# Altium footprint library Connector.PcbLib: 272 footprints (part 4 of 17)
Each footprint in its own frame and in the unit in brackets; x right, y up, seen from the top. Pads: shape width x height; smd on the part's side, far side on the other; paste and mask are expansions set on the pad; w line width, h text height; cw(c..) or ccw(c..) is an arc to the next point about the centre after c.
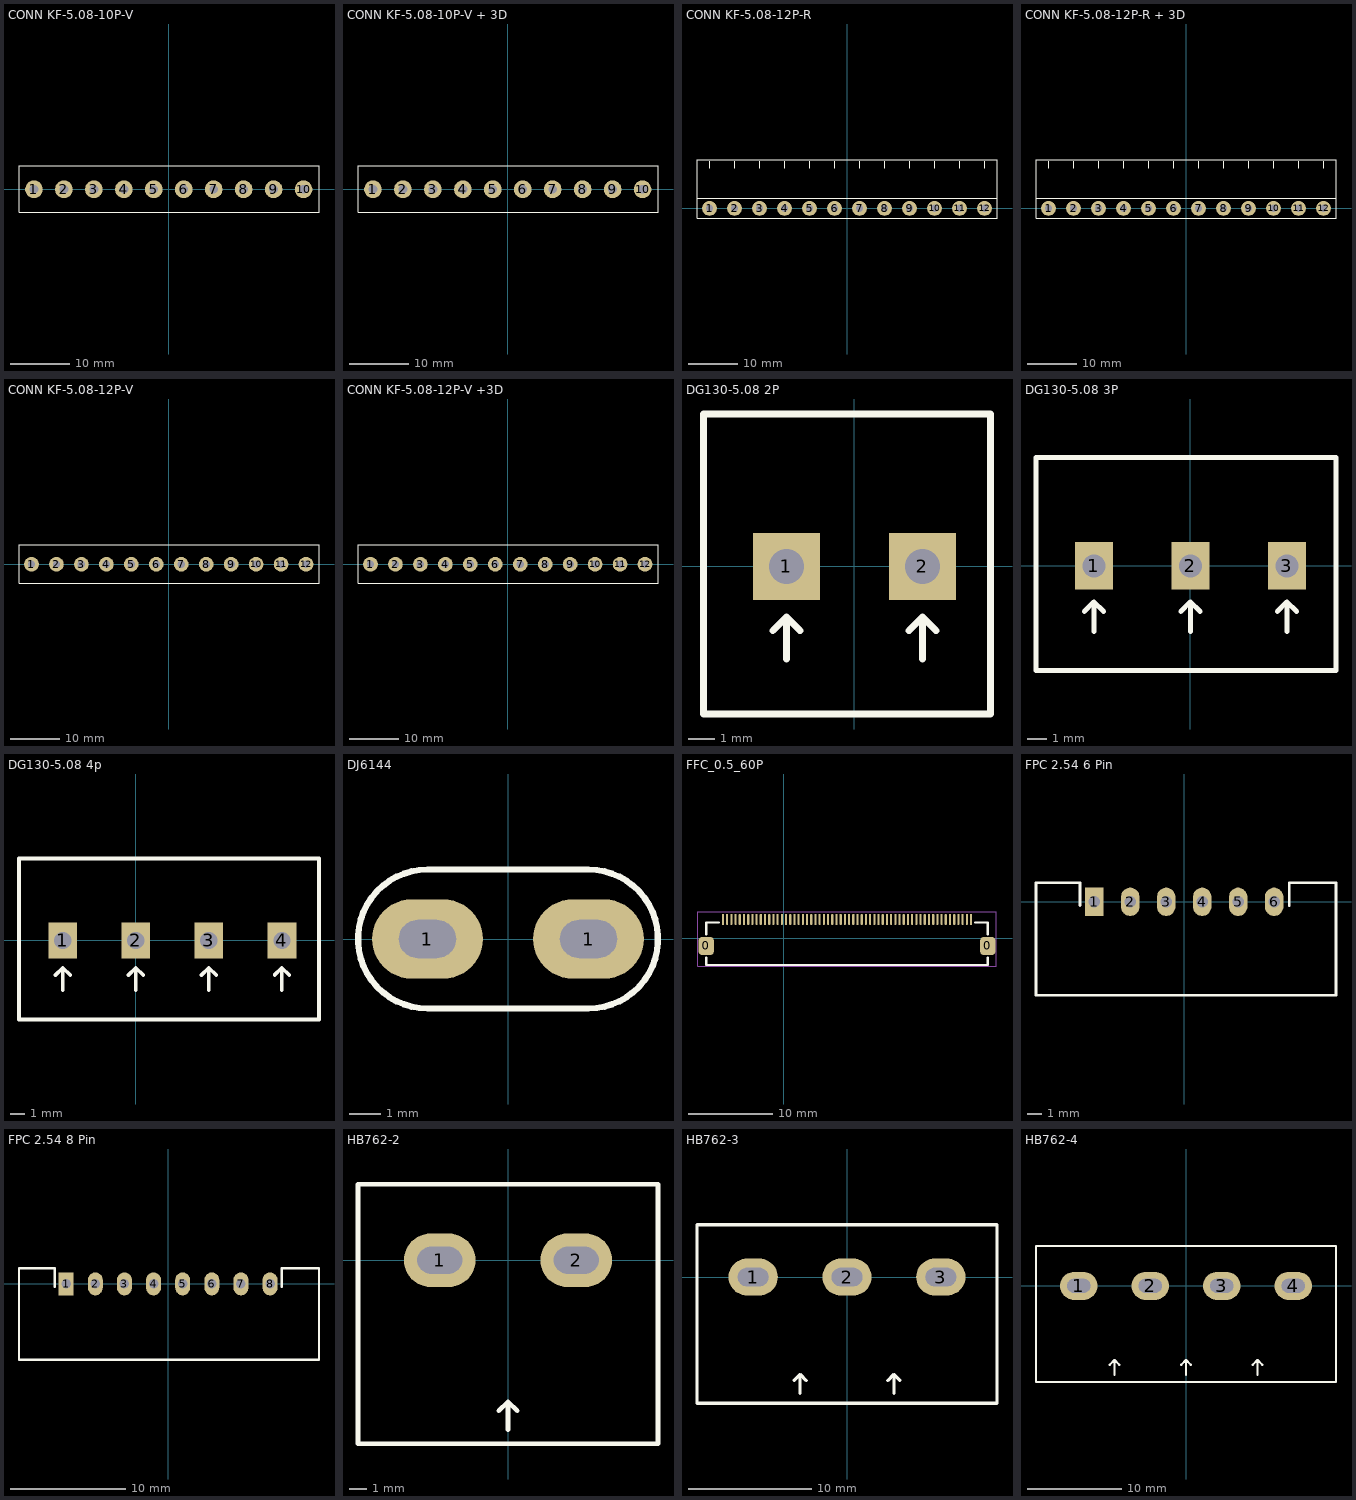
[diagram p3: the footprints below, top view; thin cyan lines are the x and y axes]

## CONN KF-5.08-10P-V [mm] "PHOENIX MSTBV 2.5/10-GF-5.08"
pads (10):
  round 3 hole 1.5: 1(-22.86,0) 2(-17.78,0) 3(-12.7,0) 4(-7.62,0) 5(-2.54,0) 6(2.54,0) 7(7.62,0) 8(12.7,0) 9(17.78,0) 10(22.86,0)
Top Overlay:
  lines w0.2: -25.4,-3.9 25.48,-3.9 25.48,4 -25.4,4 -25.4,-3.9
Top Designator:
  text ".Designator" at -3.67,0.056 h1.52
3D body "1753437.stp": height 12.1, standoff -3.8, extent 10.24,-3.8 20.24,4.8
3D body "1753437.stp": height 12.1, standoff -3.8, extent 0.08,-3.8 10.08,4.8
3D body "1753437.stp": height 12.1, standoff -3.8, extent -20.24,-3.8 -10.24,4.8
3D body "1753437.stp": height 12.1, standoff -3.8, extent -25.32,-3.8 -15.32,4.8
3D body "1753437.stp": height 12.1, standoff -3.8, extent -15.16,-3.8 -5.16,4.8
3D body "1753437.stp": height 12.1, standoff -3.8, extent -10.08,-3.8 -0.08,4.8
3D body "1753437.stp": height 12.1, standoff -3.8, extent -5,-3.8 5,4.8
3D body "1753437.stp": height 12.1, standoff -3.8, extent 5.16,-3.8 15.16,4.8
3D body "1753437.stp": height 12.1, standoff -3.8, extent 15.32,-3.8 25.32,4.8

## CONN KF-5.08-10P-V + 3D [mm] "PHOENIX MSTBV 2.5/10-GF-5.08"
pads (10):
  round 3 hole 1.5: 1(-22.86,0) 2(-17.78,0) 3(-12.7,0) 4(-7.62,0) 5(-2.54,0) 6(2.54,0) 7(7.62,0) 8(12.7,0) 9(17.78,0) 10(22.86,0)
Top Overlay:
  lines w0.2: -25.4,-3.9 25.48,-3.9 25.48,4 -25.4,4 -25.4,-3.9
Top Designator:
  text ".Designator" at -3.67,3.256 h1.52
3D body "PHOENIX_MSTB5w.stp": height 22.4, standoff 4.2, extent 0,-3.8 25.4,11.2
3D body "PHOENIX_MSTB5w.stp": height 22.4, standoff 4.2, extent -25.4,-3.8 0,11.2
3D body "1753437.stp": height 12.1, standoff -3.8, extent 10.24,-3.8 20.24,4.8
3D body "1753437.stp": height 12.1, standoff -3.8, extent 0.08,-3.8 10.08,4.8
3D body "1753437.stp": height 12.1, standoff -3.8, extent -20.24,-3.8 -10.24,4.8
3D body "1753437.stp": height 12.1, standoff -3.8, extent -25.32,-3.8 -15.32,4.8
3D body "1753437.stp": height 12.1, standoff -3.8, extent -15.16,-3.8 -5.16,4.8
3D body "1753437.stp": height 12.1, standoff -3.8, extent -10.08,-3.8 -0.08,4.8
3D body "1753437.stp": height 12.1, standoff -3.8, extent -5,-3.8 5,4.8
3D body "1753437.stp": height 12.1, standoff -3.8, extent 5.16,-3.8 15.16,4.8
3D body "1753437.stp": height 12.1, standoff -3.8, extent 15.32,-3.8 25.32,4.8

## CONN KF-5.08-12P-R [mm] "PHOENIX MSTB 2, 5-G, 5.08mm pitch"
pads (12):
  round 3 hole 1.5: 1(-27.94,0) 2(-22.86,0) 3(-17.78,0) 4(-12.7,0) 5(-7.62,0) 6(-2.54,0) 7(2.54,0) 8(7.62,0) 9(12.7,0) 10(17.78,0) 11(22.86,0) 12(27.94,0)
Top Overlay:
  lines w0.2: -30.48,2.032 30.48,2.032 ; -30.226,9.906 -0.254,9.906 ; -27.94,8.128 -27.94,9.618 ; -22.86,8.128 -22.86,9.618 ; -17.78,8.128 -17.78,9.618 ; -12.7,8.128 -12.7,9.618 ; -7.62,8.128 -7.62,9.618 ; -2.54,8.128 -2.54,9.618 ; 2.54,8.128 2.54,9.618 ; 7.62,8.128 7.62,9.618 ; 12.7,8.128 12.7,9.618 ; 17.78,8.128 17.78,9.618 ; 22.86,8.128 22.86,9.618 ; 27.94,8.128 27.94,9.618 ; -30.48,-2.032 -30.48,9.906 30.48,9.906 30.48,-2.032 -30.48,-2.032
Top Designator:
  text ".Designator" at -3.71,3.593 h1.52
3D body "PHOENIX_MSTB2.stp": height 8.6, standoff -3.5, extent -5,-2 5,10
3D body "PHOENIX_MSTB6.stp": height 8.6, standoff -3.5, extent -30.24,-2 -0.24,10
3D body "PHOENIX_MSTB6.stp": height 8.6, standoff -3.5, extent 0.24,-2 30.24,10

## CONN KF-5.08-12P-R + 3D [mm] "PHOENIX MSTB 2, 5-G, 5.08mm pitch"
pads (12):
  round 3 hole 1.5: 1(-27.94,0) 2(-22.86,0) 3(-17.78,0) 4(-12.7,0) 5(-7.62,0) 6(-2.54,0) 7(2.54,0) 8(7.62,0) 9(12.7,0) 10(17.78,0) 11(22.86,0) 12(27.94,0)
Top Overlay:
  lines w0.2: -30.48,2.032 30.48,2.032 ; -30.226,9.906 -0.254,9.906 ; -27.94,8.128 -27.94,9.618 ; -22.86,8.128 -22.86,9.618 ; -17.78,8.128 -17.78,9.618 ; -12.7,8.128 -12.7,9.618 ; -7.62,8.128 -7.62,9.618 ; -2.54,8.128 -2.54,9.618 ; 2.54,8.128 2.54,9.618 ; 7.62,8.128 7.62,9.618 ; 12.7,8.128 12.7,9.618 ; 17.78,8.128 17.78,9.618 ; 22.86,8.128 22.86,9.618 ; 27.94,8.128 27.94,9.618 ; -30.48,-2.032 30.48,-2.032 30.48,9.906 -30.48,9.906 -30.48,-2.032
Top Designator:
  text ".Designator" at -3.71,8.19 h1.52
3D body "PHOENIX_MSTB6.stp": height 8.6, standoff -3.5, extent 0.24,-2 30.24,10
3D body "PHOENIX_MSTB6.stp": height 8.6, standoff -3.5, extent -30.24,-2 -0.24,10
3D body "PHOENIX_MSTB2.stp": height 8.6, standoff -3.5, extent -5,-2 5,10
3D body "PHOENIX_MSTB6W.stp": height 15.07, standoff 0.07, extent -30.42,1 0.06,19.2
3D body "PHOENIX_MSTB6W.stp": height 15.07, standoff 0.07, extent 0.06,1 30.54,19.2

## CONN KF-5.08-12P-V [mm] "PHOENIX MSTBV 2.5/6-GF-5.08"
pads (12):
  round 3 hole 1.5: 1(-27.94,0) 2(-22.86,0) 3(-17.78,0) 4(-12.7,0) 5(-7.62,0) 6(-2.54,0) 7(2.54,0) 8(7.62,0) 9(12.7,0) 10(17.78,0) 11(22.86,0) 12(27.94,0)
Top Overlay:
  lines w0.2: -30.48,-3.9 30.58,-3.9 30.58,4 -30.48,4 -30.48,-3.9
Top Designator:
  text ".Designator" at -3.66,0.056 h1.52
3D body "1753437.stp": height 12.1, standoff -3.8, extent 20.4,-3.8 30.4,4.8
3D body "1753437.stp": height 12.1, standoff -3.8, extent 15.32,-3.8 25.32,4.8
3D body "1753437.stp": height 12.1, standoff -3.8, extent 10.24,-3.8 20.24,4.8
3D body "1753437.stp": height 12.1, standoff -3.8, extent 5.16,-3.8 15.16,4.8
3D body "1753437.stp": height 12.1, standoff -3.8, extent 0.08,-3.8 10.08,4.8
3D body "1753437.stp": height 12.1, standoff -3.8, extent -5,-3.8 5,4.8
3D body "1753437.stp": height 12.1, standoff -3.8, extent -25.32,-3.8 -15.32,4.8
3D body "1753437.stp": height 12.1, standoff -3.8, extent -30.4,-3.8 -20.4,4.8
3D body "1753437.stp": height 12.1, standoff -3.8, extent -20.24,-3.8 -10.24,4.8
3D body "1753437.stp": height 12.1, standoff -3.8, extent -15.16,-3.8 -5.16,4.8
3D body "1753437.stp": height 12.1, standoff -3.8, extent -10.08,-3.8 -0.08,4.8

## CONN KF-5.08-12P-V +3D [mm] "PHOENIX MSTBV 2.5/6-GF-5.08"
pads (12):
  round 3 hole 1.5: 1(-27.94,0) 2(-22.86,0) 3(-17.78,0) 4(-12.7,0) 5(-7.62,0) 6(-2.54,0) 7(2.54,0) 8(7.62,0) 9(12.7,0) 10(17.78,0) 11(22.86,0) 12(27.94,0)
Top Overlay:
  lines w0.2: -30.48,-3.9 30.58,-3.9 30.58,4 -30.48,4 -30.48,-3.9
Top Designator:
  text ".Designator" at -3.608,3.235 h1.52
3D body "1753437.stp": height 12.1, standoff -3.8, extent 20.4,-3.8 30.4,4.8
3D body "1753437.stp": height 12.1, standoff -3.8, extent 15.32,-3.8 25.32,4.8
3D body "1753437.stp": height 12.1, standoff -3.8, extent 10.24,-3.8 20.24,4.8
3D body "1753437.stp": height 12.1, standoff -3.8, extent 5.16,-3.8 15.16,4.8
3D body "1753437.stp": height 12.1, standoff -3.8, extent 0.08,-3.8 10.08,4.8
3D body "1753437.stp": height 12.1, standoff -3.8, extent -5,-3.8 5,4.8
3D body "1753437.stp": height 12.1, standoff -3.8, extent -25.32,-3.8 -15.32,4.8
3D body "1753437.stp": height 12.1, standoff -3.8, extent -30.4,-3.8 -20.4,4.8
3D body "1753437.stp": height 12.1, standoff -3.8, extent -20.24,-3.8 -10.24,4.8
3D body "1753437.stp": height 12.1, standoff -3.8, extent -15.16,-3.8 -5.16,4.8
3D body "1753437.stp": height 12.1, standoff -3.8, extent -10.08,-3.8 -0.08,4.8
3D body "PHOENIX_MSTB6W.stp": height 22.4, standoff 4.2, extent -30.175,-3.842 0.305,11.158
3D body "PHOENIX_MSTB6W.stp": height 22.4, standoff 4.2, extent 0.305,-3.842 30.785,11.158

## DG130-5.08 2P [mm]
pads (2):
  rect 2.5x2.5 hole 1.3: 1(-2.54,0) 2(2.54,0)
Top Overlay:
  lines w0.254: -3.048,-2.4 -2.54,-1.892 ; -2.54,-3.454 -2.54,-1.892 ; -2.032,-2.4 -2.54,-1.892 ; 2.032,-2.4 2.54,-1.892 ; 2.54,-3.454 2.54,-1.892 ; 3.048,-2.4 2.54,-1.892 ; -5.634,-5.512 5.08,-5.512 5.08,5.688 -5.634,5.688 -5.634,-5.512
Top Designator:
  text ".Designator" at -3.988,-0.256 h1.52
3D body "DG130-5.08-02P-14-00AH.STEP": height 18, standoff -5, extent -5.634,-5.512 5.076,5.688

## DG130-5.08 3P [mm]
pads (3):
  rect 2x2.5 hole 1.2: 1(-5.08,0) 2(0,0) 3(5.08,0)
Top Overlay:
  lines w0.254: -5.588,-2.4 -5.08,-1.892 ; -5.08,-3.454 -5.08,-1.892 ; -4.572,-2.4 -5.08,-1.892 ; -0.508,-2.4 0,-1.892 ; 0,-3.454 0,-1.892 ; 0.508,-2.4 0,-1.892 ; 4.572,-2.4 5.08,-1.892 ; 5.08,-3.454 5.08,-1.892 ; 5.588,-2.4 5.08,-1.892 ; -8.128,-5.5 7.662,-5.5 7.662,5.7 -8.128,5.7 -8.128,-5.5
Top Designator:
  text ".Designator" at -3.943,-0.244 h1.52
3D body "DG130-5.08-03P-14-00AH.STEP": height 18, standoff -5, extent -8.128,-5.5 7.662,5.7

## DG130-5.08 4p [mm]
pads (4):
  rect 2x2.5 hole 1.2: 1(-5.08,0) 2(0,0) 3(5.08,0) 4(10.16,0)
Top Overlay:
  lines w0.254: -5.588,-2.4 -5.08,-1.892 ; -5.08,-3.454 -5.08,-1.892 ; -4.572,-2.4 -5.08,-1.892 ; -0.508,-2.4 0,-1.892 ; 0,-3.454 0,-1.892 ; 0.508,-2.4 0,-1.892 ; 4.572,-2.4 5.08,-1.892 ; 5.08,-3.454 5.08,-1.892 ; 5.588,-2.4 5.08,-1.892 ; 9.652,-2.4 10.16,-1.892 ; 10.16,-3.454 10.16,-1.892 ; 10.668,-2.4 10.16,-1.892 ; -8.128,-5.5 12.742,-5.5 12.742,5.7 -8.128,5.7 -8.128,-5.5
Top Designator:
  text ".Designator" at -1.403,-0.244 h1.52
3D body "DG130-5.08-04P-14-00AH.STEP": height 18, standoff -5, extent -8.128,-5.5 12.742,5.7

## DJ6144 [mm] "DJ6144-6.3"
pads (2):
  oval 3.5x2.5 hole 1.2 slot 1.8 at 0 deg: 1(-2.54,0) 1(2.54,0)
Top Overlay:
  lines w0.2: -2.54,-2.191 cw(c-2.54,0) -2.54,2.191 2.54,2.191 cw(c2.54,0) 2.54,-2.191 -2.54,-2.191
3D body "DJ6144-6.3.STEP": height 9.1, standoff -2.9, extent -12.05,-0.4 4.1,0.4

## FFC_0.5_60P [mm]
height 2
pads (63):
  rrect50% 1.829x2.184 smd: 0(-9.247,-0.889) 0(24.247,-0.889)
  rrect50% 0.254x1.27 smd: 1(-7.25,2.26) 1(-7.25,2.26) 2(-6.75,2.26) 3(-6.25,2.26) 4(-5.75,2.26) 5(-5.25,2.26) 6(-4.75,2.26) 7(-4.25,2.26) 8(-3.75,2.26) 9(-3.25,2.26) 10(-2.75,2.26) 11(-2.25,2.26) 12(-1.75,2.26) 13(-1.25,2.26) 14(-0.75,2.26) 15(-0.25,2.26) 16(0.25,2.26) 17(0.75,2.26) 18(1.25,2.26) 19(1.75,2.26) 20(2.25,2.26) 21(2.75,2.26) 22(3.25,2.26) 23(3.75,2.26) 24(4.25,2.26) 25(4.75,2.26) 26(5.25,2.26) 27(5.75,2.26) 28(6.25,2.26) 29(6.75,2.26) 30(7.25,2.26) 31(7.75,2.26) 32(8.25,2.26) 33(8.75,2.26) 34(9.25,2.26) 35(9.75,2.26) 36(10.25,2.26) 37(10.75,2.26) 38(11.25,2.26) 39(11.75,2.26) 40(12.25,2.26) 41(12.75,2.26) 42(13.25,2.26) 43(13.75,2.26) 44(14.25,2.26) 45(14.75,2.26) 46(15.25,2.26) 47(15.75,2.26) 48(16.25,2.26) 49(16.75,2.26) 50(17.25,2.26) 51(17.75,2.26) 52(18.25,2.26) 53(18.75,2.26) 54(19.25,2.26) 55(19.75,2.26) 56(20.25,2.26) 57(20.75,2.26) 58(21.25,2.26) 59(21.75,2.26) 60(22.25,2.26)
Top Overlay:
  lines w0.254: -9.247,-2.286 -9.247,-3.175 24.247,-3.175 24.247,-2.286 ; -9.247,0.508 -9.247,1.905 -7.723,1.905 ; 22.723,1.905 24.247,1.905 24.247,0.508
Top Designator:
  text ".Designator" at 3.79,-0.407 h1.52
Mechanical 14:
  lines w0.051: -10.263,-3.302 -10.263,3.175 25.263,3.175 25.263,-3.302 -10.263,-3.302
3D body "FPC-60.stp": height 2.11, standoff 0, extent -9.65,-3.175 24.65,2.675

## FPC 2.54 6 Pin [mm] "FPC connecter 2.54mm 6 Pin"
pads (6):
  rect 1.3x2 hole 0.82: 1(-6.35,0)
  oval 1.3x2 hole 0.82: 2(-3.81,0) 3(-1.27,0) 4(1.27,0) 5(3.81,0) 6(6.35,0)
Top Overlay:
  lines w0.2: -7.35,-0.25 -7.35,1.35 -10.465,1.35 -10.465,-6.604 10.719,-6.604 10.719,1.35 7.417,1.35 7.417,-0.25
Top Designator:
  text ".Designator" at -5.06,-2.794 h1.52
Mechanical 15:
  lines w0.1: -1.55,0 -1.15,0 ; -1.35,-0.2 -1.35,0.2
3D body "2032-A04TRU.STEP": height 4.71, standoff -3.03, extent -5.254,-6.474 10.566,0.226
3D body "2032-A04TRU.STEP": height 4.71, standoff -3.03, extent -10.351,-6.474 5.469,0.226

## FPC 2.54 8 Pin [mm] "FPC connecter 2.54mm 8 Pin"
pads (8):
  rect 1.3x2 hole 0.82: 1(-8.89,0)
  oval 1.3x2 hole 0.82: 2(-6.35,0) 3(-3.81,0) 4(-1.27,0) 5(1.27,0) 6(3.81,0) 7(6.35,0) 8(8.89,0)
Top Overlay:
  lines w0.2: -9.89,-0.25 -9.89,1.35 -13.005,1.35 -13.005,-6.604 13.157,-6.604 13.157,1.35 9.906,1.35 9.906,-0.25
Top Designator:
  text ".Designator" at -7.6,-2.794 h1.52
Mechanical 15:
  lines w0.1: -4.09,0 -3.69,0 ; -3.89,-0.2 -3.89,0.2
3D body "2032-A08TSU-1100610.STEP": height 4.66, standoff 0.11, extent -12.891,-6.985 13.089,2.915

## HB762-2 [mm]
pads (2):
  oval 4x3 hole 1.5 slot 2.5 at 0 deg: 1(-3.81,0) 2(3.81,0)
Top Overlay:
  lines w0.254: -0.508,-8.408 0,-7.9 ; 0,-9.462 0,-7.9 ; 0.508,-8.408 0,-7.9 ; -8.37,-10.25 8.37,-10.25 8.37,4.25 -8.37,4.25 -8.37,-10.25
Top Designator:
  text ".Designator" at -3.71,-3.344 h1.52
3D body "KF7_62-2P.STEP": height 12.4, standoff -6.3, extent -7.62,-10 7.62,2

## HB762-3 [mm]
pads (3):
  oval 4x3 hole 1.5 slot 2.5 at 0 deg: 1(-7.62,0) 2(0,0) 3(7.62,0)
Top Overlay:
  lines w0.254: -4.318,-8.408 -3.81,-7.9 ; -3.81,-9.462 -3.81,-7.9 ; -3.302,-8.408 -3.81,-7.9 ; 3.302,-8.408 3.81,-7.9 ; 3.81,-9.462 3.81,-7.9 ; 4.318,-8.408 3.81,-7.9 ; -12.18,-10.25 12.18,-10.25 12.18,4.25 -12.18,4.25 -12.18,-10.25
Top Designator:
  text ".Designator" at -3.71,-3.344 h1.52
3D body "KF7_62-3P.STEP": height 12.4, standoff -6.3, extent -11.633,-10 11.632,2

## HB762-4 [mm]
pads (4):
  oval 4x3 hole 1.5 slot 2.5 at 0 deg: 1(-11.43,0) 2(-3.81,0) 3(3.81,0) 4(11.43,0)
Top Overlay:
  lines w0.254: -8.128,-8.408 -7.62,-7.9 ; -7.62,-9.462 -7.62,-7.9 ; -7.112,-8.408 -7.62,-7.9 ; -0.508,-8.408 0,-7.9 ; 0,-9.462 0,-7.9 ; 0.508,-8.408 0,-7.9 ; 7.112,-8.408 7.62,-7.9 ; 7.62,-9.462 7.62,-7.9 ; 8.128,-8.408 7.62,-7.9 ; -15.99,-10.25 -15.99,4.25 15.99,4.25 15.99,-10.25 -15.99,-10.25
Top Designator:
  text ".Designator" at -3.71,-3.344 h1.52
3D body "KF7_62-4P.STEP": height 12.4, standoff -6.3, extent -15.24,-10 15.24,2